# Altium footprint library xtal.PcbLib: 38 footprints (part 1 of 3)
Each footprint in its own frame and in the unit in brackets; x right, y up, seen from the top. Pads: shape width x height; smd on the part's side, far side on the other; paste and mask are expansions set on the pad; w line width, h text height; cw(c..) or ccw(c..) is an arc to the next point about the centre after c.
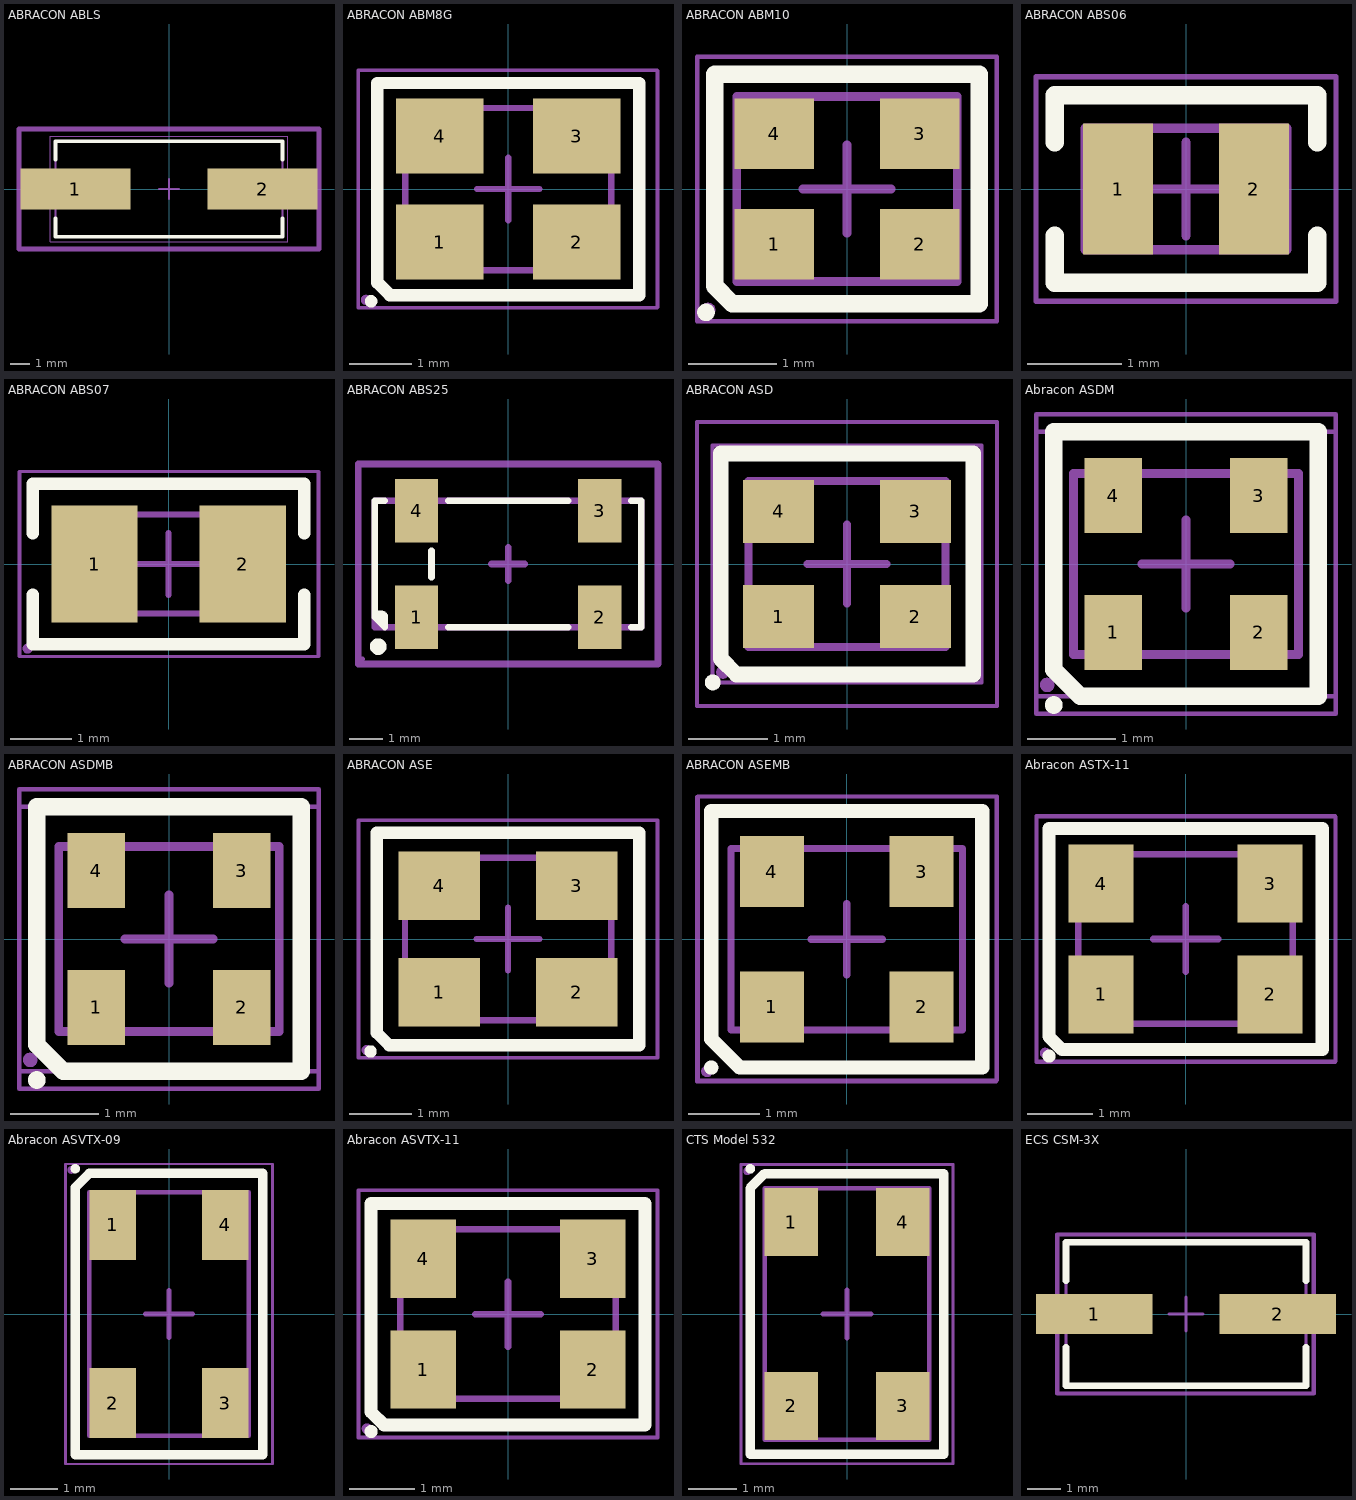
[diagram p0: the footprints below, top view; thin cyan lines are the x and y axes]

## ABRACON ABLS [mm] "Crystal, 2-Leads, Body 4.70x11.40mm, Pitch 8.80mm, IPC Medium Density"
height 4.2
pads (2):
  rect 5.6x2.1 smd: 1(-4.75,0) 2(4.75,0)
Top Overlay:
  lines w0.2: -5.775,-1.5 -5.775,-2.425 5.775,-2.425 5.775,-1.5 ; -5.775,1.5 -5.775,2.425 5.775,2.425 5.775,1.5
Mechanical 13:
  lines w0.1: -5.775,-2.425 -5.775,2.425 5.775,2.425 5.775,-2.425 -5.775,-2.425
Top Component:
  lines w0.254: -7.62,-3.048 7.62,-3.048 7.62,3.048 -7.62,3.048 -7.62,-3.048
  text ".Designator" at -1.016,-0.686 h2.54
Component Center:
  lines w0.05: -6.025,-2.675 6.025,-2.675 6.025,2.675 -6.025,2.675 -6.025,-2.675
  lines w0.1: -0.5,0 0.5,0 ; 0,-0.5 0,0.5
3D body "HC49US SMT Crystal.STEP": height 4.2, standoff 0, extent -6.35,-2.35 6.35,2.35

## ABRACON ABM8G [mm] "Crystal, 4-Leads, Body 2.50x3.20mm, Pitch 2.20mm, IPC Medium Density"
height 1
pads (4):
  rect 1.4x1.2 smd: 1(-1.1,-0.85) 2(1.1,-0.85) 3(1.1,0.85) 4(-1.1,0.85)
Top Overlay:
  circle w0.1: c-2.2,-1.8 r0.05
  lines w0.2: -2.1,-1.5 -1.9,-1.7 -1.1,-1.7 2.1,-1.7 2.1,1.7 -2.1,1.7 -2.1,-1.5
Mechanical 13:
  lines w0.1: -1.65,-1.3 1.65,-1.3 1.65,1.3 -1.65,1.3 -1.65,-1.3
Top Component:
  circle w0.051: c-2.282,-1.776 r0.057
  region: -2.282,-1.833 -2.294,-1.833 -2.315,-1.824 -2.33,-1.808 -2.339,-1.788 -2.339,-1.776 -2.339,-1.765 -2.33,-1.744 -2.315,-1.728 -2.294,-1.72 -2.282,-1.72 -2.271,-1.72 -2.25,-1.728 -2.234,-1.744 -2.226,-1.765 -2.226,-1.776 -2.226,-1.788 -2.234,-1.808 -2.25,-1.824 -2.271,-1.833
  lines w0.051: -2.409,-1.903 2.388,-1.903 2.388,1.905 -2.409,1.905 -2.409,-1.903
  text ".Designator" at -0.508,-0.356 h1.27
Component Center:
  lines w0.05: -2.4,-1.9 2.4,-1.9 2.4,1.9 -2.4,1.9 -2.4,-1.9
  lines w0.1: -0.5,0 0.5,0 ; 0,-0.5 0,0.5
3D body "Abracon ABM8G.STEP": height 0.6, standoff 0, extent -1.61,-1.26 1.61,1.26

## ABRACON ABM10 [mm] "Crystal, 4-Leads, Body 2.00x2.45mm, Pitch 1.65mm, IPC Medium Density"
height 0.7
pads (4):
  rect 0.9x0.8 smd: 1(-0.825,-0.625) 2(0.825,-0.625) 3(0.825,0.625) 4(-0.825,0.625)
Top Overlay:
  circle w0.1: c-1.6,-1.4 r0.05
  lines w0.2: -1.5,-1.1 -1.5,1.3 1.5,1.3 1.5,-1.3 -1.3,-1.3 -1.5,-1.1
Mechanical 13:
  lines w0.1: -1.25,-1.05 1.25,-1.05 1.25,1.05 -1.25,1.05 -1.25,-1.05
Top Component:
  circle w0.051: c-1.575,-1.372 r0.057
  region: -1.575,-1.428 -1.586,-1.428 -1.607,-1.42 -1.623,-1.404 -1.632,-1.383 -1.632,-1.372 -1.632,-1.36 -1.623,-1.339 -1.607,-1.323 -1.586,-1.315 -1.575,-1.315 -1.564,-1.315 -1.543,-1.323 -1.527,-1.339 -1.518,-1.36 -1.518,-1.372 -1.518,-1.383 -1.527,-1.404 -1.543,-1.42 -1.564,-1.428
  lines w0.051: -1.702,-1.499 1.702,-1.499 1.702,1.499 -1.702,1.499 -1.702,-1.499
  text ".Designator" at -0.305,-0.203 h0.76
Component Center:
  lines w0.05: -1.7,-1.5 1.7,-1.5 1.7,1.5 -1.7,1.5 -1.7,-1.5
  lines w0.1: -0.5,0 0.5,0 ; 0,-0.5 0,0.5
3D body "Abracon ABM10.STEP": height 0.5, standoff 0, extent -1.275,-1.025 1.275,1.025

## ABRACON ABS06 [mm] "Crystal, 2-Leads, Body 1.20x2.00mm, Pitch 1.50mm, IPC Medium Density"
height 0.6
pads (2):
  rect 0.75x1.4 smd: 1(-0.725,0) 2(0.725,0)
Top Overlay:
  lines w0.2: -1.4,-0.5 -1.4,-1 0,-1 1.4,-1 1.4,-0.5 ; -1.4,0.5 -1.4,1 1.4,1 1.4,0.5
Mechanical 13:
  lines w0.1: -1.075,-0.65 -1.075,0.65 1.075,0.65 1.075,-0.65 -1.075,-0.65
Top Component:
  lines w0.051: -1.6,-1.194 -1.6,1.194 1.6,1.194 1.6,-1.194 -1.6,-1.194
  text ".Designator" at -0.305,-0.203 h0.76
Component Center:
  lines w0.05: -1.6,-1.2 1.6,-1.2 1.6,1.2 -1.6,1.2 -1.6,-1.2
  lines w0.1: -0.5,0 0.5,0 ; 0,-0.5 0,0.5
3D body "Abracon ABS06.STEP": height 0.6, standoff 0, extent -1.025,-0.625 1.025,0.625

## ABRACON ABS07 [mm] "Crystal, 2-Leads, Body 3.20x1.50mm, IPC Medium Density"
height 0.9
pads (2):
  rect 1.4x1.9 smd: 1(-1.2,0) 2(1.2,0)
Top Overlay:
  lines w0.2: -2.2,-0.5 -2.2,-1.3 2.2,-1.3 2.2,-0.5 ; -2.2,0.5 -2.2,1.3 2.2,1.3 2.2,0.5
Mechanical 13:
  lines w0.1: -1.65,-0.8 1.65,-0.8 1.65,0.8 -1.65,0.8 -1.65,-0.8
Top Component:
  circle w0.051: c-2.286,-1.372 r0.057
  region: -2.286,-1.428 -2.297,-1.428 -2.318,-1.42 -2.334,-1.404 -2.343,-1.383 -2.343,-1.372 -2.343,-1.36 -2.334,-1.339 -2.318,-1.323 -2.297,-1.315 -2.286,-1.315 -2.275,-1.315 -2.254,-1.323 -2.238,-1.339 -2.229,-1.36 -2.229,-1.372 -2.229,-1.383 -2.238,-1.404 -2.254,-1.42 -2.275,-1.428
  lines w0.051: -2.413,-1.499 2.438,-1.499 2.438,1.499 -2.413,1.499 -2.413,-1.499
  text ".Designator" at -0.305,-0.203 h0.76
Component Center:
  lines w0.05: -2.425,-1.5 2.425,-1.5 2.425,1.5 -2.425,1.5 -2.425,-1.5
  lines w0.1: -0.5,0 0.5,0 ; 0,-0.5 0,0.5
3D body "Abracon ABS07.STEP": height 0.9, standoff 0, extent -1.625,-0.775 1.625,0.775

## ABRACON ABS25 [mm]
height 2.5
pads (4):
  rect 1.3x1.9 smd: 1(-2.75,-1.6) 2(2.75,-1.6) 3(2.75,1.6) 4(-2.75,1.6)
Top Overlay:
  circle w0.25: c-3.9,-2.48 r0.125
  region: -4,-1.5 -4,-1.6 -3.7,-1.9 -3.7,-1.6 -3.8,-1.5
  lines w0.2: -3.7,1.9 -4,1.9 -4,0 -4,-1.6 ; -2.3,-0.4 -2.3,0.4 ; -1.8,-1.9 1.8,-1.9 ; -1.8,1.9 1.8,1.9 ; 3.7,-1.9 4,-1.9 4,0 4,1.9 3.7,1.9 ; -4,-1.6 cw(c-3.9,-1.6) -3.9,-1.5 -3.8,-1.5 cw(c-3.8,-1.6) -3.7,-1.6 -3.7,-1.9 -4,-1.6
Mechanical 1:
  lines w0.2: -4,-1.9 -4,1.9 4,1.9 4,-1.9 -4,-1.9
Top Component:
  circle w0.051: c-4.379,-2.855 r0.057
  region: -4.379,-2.912 -4.391,-2.912 -4.412,-2.904 -4.428,-2.888 -4.436,-2.867 -4.436,-2.855 -4.436,-2.844 -4.428,-2.823 -4.412,-2.807 -4.391,-2.799 -4.379,-2.799 -4.368,-2.799 -4.347,-2.807 -4.331,-2.823 -4.323,-2.844 -4.323,-2.855 -4.323,-2.867 -4.331,-2.888 -4.347,-2.904 -4.368,-2.912
  lines w0.051: -4.506,-2.982 4.496,-2.982 4.496,2.997 -4.506,2.997 -4.506,-2.982
  text ".Designator" at -0.61,-0.406 h1.52
Component Center:
  lines w0.2: -0.5,0 0.5,0 ; 0,-0.5 0,0.5 ; -4.5,-3 4.5,-3 4.5,3 -4.5,3 -4.5,-3
3D body "Abracon ABS25.STEP": height 2.5, standoff 0, extent -4,-1.9 4,1.9

## ABRACON ASD [mm] "Crystal, 4-Leads, Body 2.00x2.45mm, Pitch 1.65mm, IPC Medium Density"
height 1
pads (4):
  rect 0.9x0.8 smd: 1(-0.865,-0.665) 2(0.865,-0.665) 3(0.865,0.665) 4(-0.865,0.665)
Top Overlay:
  circle w0.1: c-1.7,-1.5 r0.05
  lines w0.2: -1.6,-1.2 -1.4,-1.4 1.6,-1.4 1.6,1.4 -1.6,1.4 -1.6,-1.2
Mechanical 13:
  lines w0.1: -1.25,-1.05 -1.25,1.05 1.25,1.05 1.25,-1.05 -1.25,-1.05
Top Component:
  circle w0.051: c-1.575,-1.372 r0.057
  region: -1.575,-1.428 -1.586,-1.428 -1.607,-1.42 -1.623,-1.404 -1.632,-1.383 -1.632,-1.372 -1.632,-1.36 -1.623,-1.339 -1.607,-1.323 -1.586,-1.315 -1.575,-1.315 -1.564,-1.315 -1.543,-1.323 -1.527,-1.339 -1.518,-1.36 -1.518,-1.372 -1.518,-1.383 -1.527,-1.404 -1.543,-1.42 -1.564,-1.428
  lines w0.051: -1.702,-1.499 1.702,-1.499 1.702,1.499 -1.702,1.499 -1.702,-1.499
  text ".Designator" at -0.305,-0.203 h0.76
Component Center:
  lines w0.05: -1.9,-1.8 1.9,-1.8 1.9,1.8 -1.9,1.8 -1.9,-1.8
  lines w0.1: -0.5,0 0.5,0 ; 0,-0.5 0,0.5
3D body "Abracon ASD.STEP": height 1, standoff 0, extent -1.275,-1.025 1.275,1.025

## Abracon ASDM [mm] "MEMS Clock, 4-Leads, Body 2.00x2.50mm, Pitch 1.65mm, IPC Medium Density"
height 0.85
pads (4):
  rect 0.65x0.85 smd: 1(-0.825,-0.775) 2(0.825,-0.775) 3(0.825,0.775) 4(-0.825,0.775)
Top Overlay:
  circle w0.1: c-1.5,-1.6 r0.05
  lines w0.2: -1.5,-1.2 -1.5,1.5 1.5,1.5 1.5,-1.5 -1.2,-1.5 -1.5,-1.2
Mechanical 13:
  lines w0.1: -1.275,-1.025 -1.275,1.025 1.275,1.025 1.275,-1.025 -1.275,-1.025
Top Component:
  circle w0.051: c-1.575,-1.372 r0.057
  region: -1.575,-1.428 -1.586,-1.428 -1.607,-1.42 -1.623,-1.404 -1.632,-1.383 -1.632,-1.372 -1.632,-1.36 -1.623,-1.339 -1.607,-1.323 -1.586,-1.315 -1.575,-1.315 -1.564,-1.315 -1.543,-1.323 -1.527,-1.339 -1.518,-1.36 -1.518,-1.372 -1.518,-1.383 -1.527,-1.404 -1.543,-1.42 -1.564,-1.428
  lines w0.051: -1.702,-1.499 -1.702,1.499 1.702,1.499 1.702,-1.499 -1.702,-1.499
  text ".Designator" at -0.305,-0.203 h0.76
Component Center:
  lines w0.05: -1.7,-1.7 1.7,-1.7 1.7,1.7 -1.7,1.7 -1.7,-1.7
  lines w0.1: -0.5,0 0.5,0 ; 0,-0.5 0,0.5
3D body: height 0.85, standoff 0, extent -1.275,-1.025 1.275,1.025

## ABRACON ASDMB [mm] "MEMS Clock, 4-Leads, Body 2.00x2.45mm, Pitch 1.65mm, IPC Medium Density"
height 0.85
pads (4):
  rect 0.65x0.85 smd: 1(-0.825,-0.775) 2(0.825,-0.775) 3(0.825,0.775) 4(-0.825,0.775)
Top Overlay:
  circle w0.1: c-1.5,-1.6 r0.05
  lines w0.2: -1.5,-1.2 -1.5,1.5 1.5,1.5 1.5,-1.5 -1.2,-1.5 -1.5,-1.2
Mechanical 13:
  lines w0.1: -1.25,-1.05 1.25,-1.05 1.25,1.05 -1.25,1.05 -1.25,-1.05
Top Component:
  circle w0.051: c-1.575,-1.372 r0.057
  region: -1.575,-1.428 -1.586,-1.428 -1.607,-1.42 -1.623,-1.404 -1.632,-1.383 -1.632,-1.372 -1.632,-1.36 -1.623,-1.339 -1.607,-1.323 -1.586,-1.315 -1.575,-1.315 -1.564,-1.315 -1.543,-1.323 -1.527,-1.339 -1.518,-1.36 -1.518,-1.372 -1.518,-1.383 -1.527,-1.404 -1.543,-1.42 -1.564,-1.428
  lines w0.051: -1.702,-1.499 1.702,-1.499 1.702,1.499 -1.702,1.499 -1.702,-1.499
  text ".Designator" at -0.305,-0.203 h0.76
Component Center:
  lines w0.05: -1.7,-1.7 1.7,-1.7 1.7,1.7 -1.7,1.7 -1.7,-1.7
  lines w0.1: -0.5,0 0.5,0 ; 0,-0.5 0,0.5
3D body: height 0.85, standoff 0, extent -1.25,-1.05 1.25,1.05

## ABRACON ASE [mm] "Crystal, 4-Leads, Body 2.50x3.20mm, Pitch 2.20mm, IPC Medium Density"
height 1
pads (4):
  rect 1.3x1.1 smd: 1(-1.1,-0.85) 2(1.1,-0.85) 3(1.1,0.85) 4(-1.1,0.85)
Top Overlay:
  circle w0.1: c-2.2,-1.8 r0.05
  lines w0.2: -2.1,-1.5 -2.1,1.7 2.1,1.7 2.1,-1.7 -1.1,-1.7 -1.9,-1.7 -2.1,-1.5
Mechanical 13:
  lines w0.1: -1.65,-1.3 -1.65,1.3 1.65,1.3 1.65,-1.3 -1.65,-1.3
Top Component:
  circle w0.051: c-2.261,-1.778 r0.057
  region: -2.261,-1.835 -2.272,-1.835 -2.293,-1.826 -2.309,-1.81 -2.317,-1.789 -2.317,-1.778 -2.317,-1.767 -2.309,-1.746 -2.293,-1.73 -2.272,-1.721 -2.261,-1.721 -2.249,-1.721 -2.228,-1.73 -2.212,-1.746 -2.204,-1.767 -2.204,-1.778 -2.204,-1.789 -2.212,-1.81 -2.228,-1.826 -2.249,-1.835
  lines w0.051: -2.388,-1.905 2.388,-1.905 2.388,1.905 -2.388,1.905 -2.388,-1.905
  text ".Designator" at -0.305,-0.203 h0.76
Component Center:
  lines w0.05: -2.4,-1.9 2.4,-1.9 2.4,1.9 -2.4,1.9 -2.4,-1.9
  lines w0.1: -0.5,0 0.5,0 ; 0,-0.5 0,0.5
3D body "Abracon ASE.STEP": height 1.2, standoff 0, extent -1.625,-1.275 1.625,1.275

## ABRACON ASEMB [mm] "MEMS Clock, 4-Leads, Body 2.50x3.20mm, Pitch 2.10mm, IPC Medium Density"
height 0.85
pads (4):
  rect 0.9x1 smd: 1(-1.05,-0.95) 2(1.05,-0.95) 3(1.05,0.95) 4(-1.05,0.95)
Top Overlay:
  circle w0.1: c-1.9,-1.8 r0.05
  lines w0.2: -1.9,-1.4 -1.9,1.8 1.9,1.8 1.9,-1.8 -1.5,-1.8 -1.9,-1.4
Mechanical 13:
  lines w0.1: -1.625,-1.275 1.625,-1.275 1.625,1.275 -1.625,1.275 -1.625,-1.275
Top Component:
  circle w0.051: c-1.959,-1.853 r0.057
  region: -1.959,-1.909 -1.971,-1.909 -1.992,-1.901 -2.008,-1.885 -2.016,-1.864 -2.016,-1.853 -2.016,-1.841 -2.008,-1.82 -1.992,-1.804 -1.971,-1.796 -1.959,-1.796 -1.948,-1.796 -1.927,-1.804 -1.911,-1.82 -1.903,-1.841 -1.903,-1.853 -1.903,-1.864 -1.911,-1.885 -1.927,-1.901 -1.948,-1.909
  lines w0.051: -2.086,-1.98 2.108,-1.98 2.108,2.007 -2.086,2.007 -2.086,-1.98
  text ".Designator" at -0.305,-0.203 h0.76
Component Center:
  lines w0.05: -2.1,-2 2.1,-2 2.1,2 -2.1,2 -2.1,-2
  lines w0.1: -0.5,0 0.5,0 ; 0,-0.5 0,0.5
3D body: height 0.85, standoff 0, extent -1.625,-1.275 1.625,1.275

## Abracon ASTX-11 [mm] "Crystal, 4-Leads, Body 2.50x3.20mm, Pitch 2.38mm, IPC Medium Density"
height 0.9
pads (4):
  rect 1x1.2 smd: 1(-1.3,-0.85) 2(1.3,-0.85) 3(1.3,0.85) 4(-1.3,0.85)
Top Overlay:
  circle w0.1: c-2.1,-1.8 r0.05
  lines w0.2: -2.1,-1.5 -2.1,1.7 2.1,1.7 2.1,-1.7 -1.9,-1.7 -2.1,-1.5
Mechanical 13:
  lines w0.1: -1.65,-1.3 1.65,-1.3 1.65,1.3 -1.65,1.3 -1.65,-1.3
Top Component:
  circle w0.051: c-2.159,-1.753 r0.057
  region: -2.159,-1.809 -2.17,-1.809 -2.191,-1.801 -2.207,-1.785 -2.216,-1.764 -2.216,-1.753 -2.216,-1.741 -2.207,-1.72 -2.191,-1.704 -2.17,-1.696 -2.159,-1.696 -2.148,-1.696 -2.127,-1.704 -2.111,-1.72 -2.102,-1.741 -2.102,-1.753 -2.102,-1.764 -2.111,-1.785 -2.127,-1.801 -2.148,-1.809
  lines w0.051: -2.286,-1.88 2.311,-1.88 2.311,1.88 -2.286,1.88 -2.286,-1.88
  text ".Designator" at -0.305,-0.203 h0.76
Component Center:
  lines w0.05: -2.3,-1.9 2.3,-1.9 2.3,1.9 -2.3,1.9 -2.3,-1.9
  lines w0.1: -0.5,0 0.5,0 ; 0,-0.5 0,0.5
3D body "Abracon ASVTX-11.STEP": height 0.9, standoff 0, extent -1.61,-1.26 1.61,1.26

## Abracon ASVTX-09 [mm] "XO, 4-Leads, Body 5.00x3.20mm, Pitch 3.70mm, IPC Medium Density"
height 1.5
pads (4):
  rect 1x1.5 smd: 1(-1.2,1.9) 2(-1.2,-1.9) 3(1.2,-1.9) 4(1.2,1.9)
Top Overlay:
  circle w0.1: c-2,3.1 r0.05
  lines w0.2: -2,-3 2,-3 2,3 -1.7,3 -2,2.7 -2,-3
Mechanical 13:
  lines w0.1: -1.7,-2.6 -1.7,2.6 1.7,2.6 1.7,-2.6 -1.7,-2.6
Top Component:
  circle w0.051: c-2.083,3.073 r0.057
  region: -2.14,3.073 -2.14,3.085 -2.131,3.106 -2.115,3.122 -2.094,3.13 -2.083,3.13 -2.072,3.13 -2.051,3.122 -2.035,3.106 -2.026,3.085 -2.026,3.073 -2.026,3.062 -2.035,3.041 -2.051,3.025 -2.072,3.017 -2.083,3.017 -2.094,3.017 -2.115,3.025 -2.131,3.041 -2.14,3.062
  lines w0.051: -2.21,-3.2 2.21,-3.2 2.21,3.2 -2.21,3.2 -2.21,-3.2
  text ".Designator" at -0.203,0.305 h0.76
Component Center:
  lines w0.05: -2.2,-3.2 2.2,-3.2 2.2,3.2 -2.2,3.2 -2.2,-3.2
  lines w0.1: -0.5,0 0.5,0 ; 0,-0.5 0,0.5
3D body "Abracon ASVTX-09.STEP": height 1.5, standoff 0, extent -1.625,-2.525 1.625,2.525

## Abracon ASVTX-11 [mm] "Crystal, 4-Leads, Body 2.50x3.20mm, Pitch 2.38mm, IPC Medium Density"
height 0.9
pads (4):
  rect 1x1.2 smd: 1(-1.3,-0.85) 2(1.3,-0.85) 3(1.3,0.85) 4(-1.3,0.85)
Top Overlay:
  circle w0.1: c-2.1,-1.8 r0.05
  lines w0.2: -2.1,-1.5 -2.1,1.7 2.1,1.7 2.1,-1.7 -1.9,-1.7 -2.1,-1.5
Mechanical 13:
  lines w0.1: -1.65,-1.3 1.65,-1.3 1.65,1.3 -1.65,1.3 -1.65,-1.3
Top Component:
  circle w0.051: c-2.161,-1.756 r0.057
  region: -2.161,-1.813 -2.172,-1.813 -2.193,-1.804 -2.209,-1.788 -2.217,-1.768 -2.217,-1.756 -2.217,-1.745 -2.209,-1.724 -2.193,-1.708 -2.172,-1.699 -2.161,-1.699 -2.149,-1.699 -2.128,-1.708 -2.113,-1.724 -2.104,-1.745 -2.104,-1.756 -2.104,-1.768 -2.113,-1.788 -2.128,-1.804 -2.149,-1.813
  lines w0.051: -2.288,-1.883 2.286,-1.883 2.286,1.905 -2.288,1.905 -2.288,-1.883
  text ".Designator" at -0.305,-0.203 h0.76
Component Center:
  lines w0.05: -2.3,-1.9 2.3,-1.9 2.3,1.9 -2.3,1.9 -2.3,-1.9
  lines w0.1: -0.5,0 0.5,0 ; 0,-0.5 0,0.5
3D body "Abracon ASVTX-11.STEP": height 0.9, standoff 0, extent -1.61,-1.26 1.61,1.26

## CTS Model 532 [mm] "XO, 4-Leads, Body 5.00x3.20mm, Pitch 3.70mm, IPC Medium Density"
height 1.2
pads (4):
  rect 1.1x1.4 smd: 1(-1.15,1.9) 2(-1.15,-1.9) 3(1.15,-1.9) 4(1.15,1.9)
Top Overlay:
  circle w0.1: c-2,3 r0.05
  lines w0.2: -2,-2.9 -2,2.6 -1.7,2.9 2,2.9 2,-2.9 -2,-2.9
Mechanical 13:
  lines w0.1: -1.7,-2.6 1.7,-2.6 1.7,2.6 -1.7,2.6 -1.7,-2.6
Top Component:
  circle w0.051: c-2.057,2.952 r0.057
  region: -2.114,2.952 -2.114,2.964 -2.106,2.985 -2.09,3.001 -2.069,3.009 -2.057,3.009 -2.046,3.009 -2.025,3.001 -2.009,2.985 -2.001,2.964 -2.001,2.952 -2.001,2.941 -2.009,2.92 -2.025,2.904 -2.046,2.896 -2.057,2.896 -2.069,2.896 -2.09,2.904 -2.106,2.92 -2.114,2.941
  lines w0.051: -2.184,-3.099 2.184,-3.099 2.184,3.079 -2.184,3.079 -2.184,-3.099
  text ".Designator" at -0.203,0.305 h0.76
Component Center:
  lines w0.05: -2.2,-3.1 2.2,-3.1 2.2,3.1 -2.2,3.1 -2.2,-3.1
  lines w0.1: -0.5,0 0.5,0 ; 0,-0.5 0,0.5
3D body "CTS 532.STEP": height 1.2, standoff 0, extent -1.625,-2.525 1.625,2.525

## ECS CSM-3X [mm] "Crystal, 2-Leads, Body 4.10x7.00mm, Pitch 5.00mm, IPC Medium Density"
height 2.3
pads (2):
  rect 3.5x1.2 smd: 1(-2.75,0) 2(2.75,0)
Top Overlay:
  lines w0.2: -3.6,-1 -3.6,-2.15 3.6,-2.15 3.6,-1 ; -3.6,1 -3.6,2.15 3.6,2.15 3.6,1
Mechanical 13:
  lines w0.1: -3.6,-2.15 3.6,-2.15 3.6,2.15 -3.6,2.15 -3.6,-2.15
Top Component:
  lines w0.127: -3.861,-2.388 3.835,-2.388 3.835,2.388 -3.861,2.388 -3.861,-2.388
  text ".Designator" at -0.305,-0.203 h0.76
Component Center:
  lines w0.05: -3.85,-2.4 3.85,-2.4 3.85,2.4 -3.85,2.4 -3.85,-2.4
  lines w0.1: -0.5,0 0.5,0 ; 0,-0.5 0,0.5
3D body "ECS CSM-3X.STEP": height 2.3, standoff 0, extent -3.8,-2.05 3.8,2.05